# Altium schematic symbol library 传感器.SchLib: 1 symbol
Pins are listed as number, name and electrical type; pins without a type are passive.

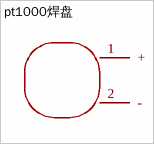
[diagram p0: symbol pt1000焊盘]

## pt1000焊盘
designator U??  (value not drawn)
AddInBom: yes; SymbolName: PT1000焊盘; ConvertToPcb: yes
footprint PT1000焊盘
pins: 1 +, 2 -